# Altium footprint library S_D.PcbLib: 40 footprints (part 3 of 3)
Each footprint in its own frame and in the unit in brackets; x right, y up, seen from the top. Pads: shape width x height; smd on the part's side, far side on the other; paste and mask are expansions set on the pad; w line width, h text height; cw(c..) or ccw(c..) is an arc to the next point about the centre after c.
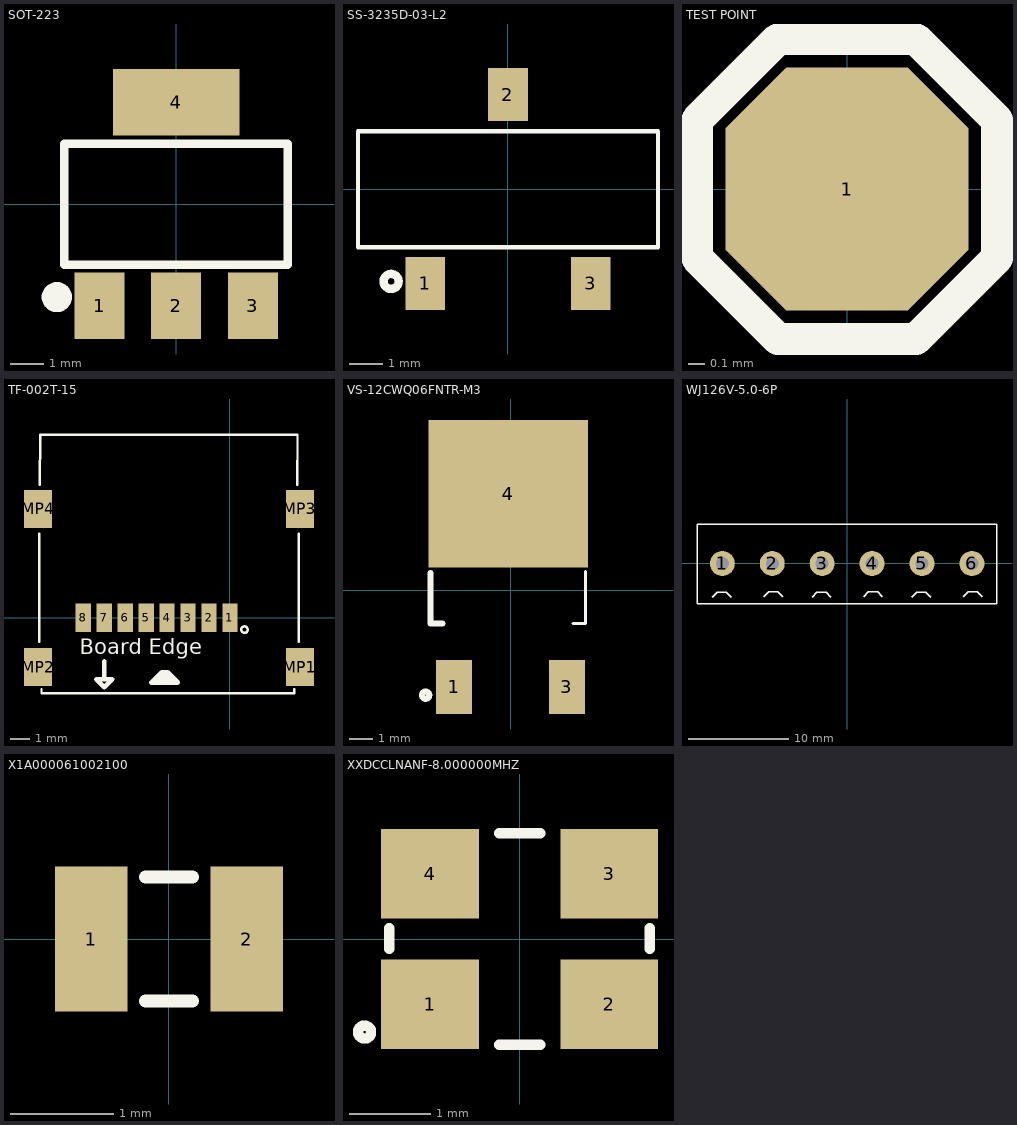
[diagram p2: the footprints below, top view; thin cyan lines are the x and y axes]

## SOT-223 [mm]
pads (4):
  rect 1.5x2 smd: 1(-2.3,-3.05) 2(0,-3.05) 3(2.3,-3.05)
  rect 3.8x2 smd: 4(0,3.05)
Top Overlay:
  circle w0.5: c-3.581,-2.794 r0.203
  lines w0.254: -3.353,-1.829 3.353,-1.829 3.353,1.803 -3.353,1.803 -3.353,-1.829
3D body "User Library-SOT-223-1.step": height 1.61, standoff -0.04, extent -3.25,-3.5 3.25,3.5

## SS-3235D-03-L2 [mm] "SPDT 50mA @ 12VDC 12V On-On SMD Toggle Switches RoHS"
pads (3):
  rect 1.2x1.6 smd: 1(-2.5,-2.85) 3(2.5,-2.85)
  rect 1.21x1.6 smd: 2(0,2.85)
Top Overlay:
  circle w0.254: c-3.531,-2.794 r0.227
  lines w0.127: -4.532,-1.758 -4.532,1.747 4.536,1.747 4.536,-1.758 -4.532,-1.758
3D body "ss-3235d-03-l2.stp": height 6.4, standoff 0, extent -4.499,-3.45 4.551,3.45

## TEST POINT [mil]
pads (1):
  oct 60x60 smd: 1(0,0)
Top Overlay:
  lines w7.87: -17,-37 17,-37 ; -17,-37 -37,-17 -37,17 -17,37 ; -17,-37 17,-37 ; -17,37 17,37 ; -17,37 17,37 ; 17,-37 37,-17 37,17 17,37

## TF-002T-15 [mm] "SMD SD Card Connectors ROHS"
pads (12):
  rect 0.8x1.5 smd: 1(0,0) 2(-1.1,0) 3(-2.2,0) 4(-3.3,0) 5(-4.4,0) 6(-5.5,0) 7(-6.6,0) 8(-7.7,0)
  rect 1.45x2 smd: MP1(3.675,-2.6) MP2(-10.075,-2.6) MP3(3.675,5.7) MP4(-10.075,5.7)
Top Overlay:
  circle w0.127: c0.762,-0.635 r0.17
  region: -3.01,-2.972 -3.848,-2.972 -3.848,-3.404 -3.01,-3.404
  lines w0.127: -10.008,-1.27 -10.008,4.394 ; -9.984,6.96 -9.968,9.601 3.545,9.601 3.528,6.96 ; -9.894,-3.759 -9.894,-3.98 3.373,-3.98 3.373,-3.759 ; 3.608,-1.27 3.608,4.394
  lines w0.254: -6.6,-2.311 -6.6,-3.238 ; -6.6,-3.238 -6.19,-3.238 -6.6,-3.649 -7.01,-3.238 -6.6,-3.238 ; -4.115,-3.404 -2.743,-3.404 -3.277,-2.87 -3.581,-2.87 -4.115,-3.404
  text "Board Edge" at -7.874,-1.918 h0.8
3D body "TF-002T-15_C125616.stp": height 1.8, standoff -0.03, extent -10.465,-4.737 4.035,9.563

## VS-12CWQ06FNTR-M3 [mm] "DIODE ARRAY SCHOTTKY 60V 6A DPAK"
pads (3):
  rect 1.524x2.28 smd: 1(-2.38,-4.072) 3(2.38,-4.072)
  rect 6.74x6.23 smd: 4(-0.1,4.073)
Top Overlay:
  circle w0.254: c-3.581,-4.42 r0.152
  lines w0.127: 2.629,-1.397 3.17,-1.397 3.17,0.79
  lines w0.254: -3.37,0.73 -3.37,-1.397 -2.87,-1.397
3D body "User Library-DPAK-1.STEP": height 2.39, standoff -0.02, extent -3.37,-4.312 3.17,5.626

## WJ126V-5.0-6P [mm]
pads (6):
  round 2.5 hole 1.3: 1(-12.5,0) 2(-7.5,0) 3(-2.5,0) 4(2.5,0) 5(7.5,0) 6(12.5,0)
Top Overlay:
  lines w0.127: -13.507,-3.358 -13.03,-2.881 -12.102,-2.881 -11.625,-3.358 ; -8.35,-3.332 -7.874,-2.856 -6.945,-2.856 -6.469,-3.332 ; -3.507,-3.358 -3.03,-2.881 -2.102,-2.881 -1.625,-3.358 ; 1.65,-3.332 2.126,-2.856 3.055,-2.856 3.531,-3.332 ; 6.493,-3.358 6.97,-2.881 7.898,-2.881 8.375,-3.358 ; 11.65,-3.332 12.126,-2.856 13.055,-2.856 13.531,-3.332 ; 15.011,-4.027 0,-4.027 -15.041,-4.027 -15.041,3.925 0,3.925 15.011,3.925 15.016,3.921 15.016,-4.027
3D body "Screw Terminal Block 5mm 6-way.step": height 10, standoff -2, extent -15.15,-4.051 15,3.949

## X1A000061002100 [mm]
pads (2):
  rect 0.7x1.4 smd: 1(-0.75,0) 2(0.75,0)
Top Overlay:
  lines w0.127: -0.229,-0.6 0,-0.6 0.229,-0.6 ; -0.229,0.6 0,0.6 0.229,0.6
3D body "User Library-ABS06-1.step": height 0.6, standoff 0, extent -1,-0.6 1,0.6

## XXDCCLNANF-8.000000MHZ [mm]
pads (4):
  rect 1.2x1.1 smd: 1(-1.1,-0.8) 2(1.1,-0.8) 3(1.1,0.8) 4(-1.1,0.8)
Top Overlay:
  circle w0.127: c-1.905,-1.143 r0.08
  lines w0.127: -1.6,-0.122 -1.6,0.132 ; -0.254,-1.3 0,-1.3 0.254,-1.3 ; -0.254,1.3 0,1.3 0.254,1.3 ; 1.6,-0.122 1.6,0.132
3D body "User Library-XTAL-3_2x2_5.step": height 0.91, standoff -0.01, extent -1.6,-1.25 1.6,1.25